# Altium footprint library MasterLib.PcbLib: 54 footprints (part 4 of 4)
Each footprint in its own frame and in the unit in brackets; x right, y up, seen from the top. Pads: shape width x height; smd on the part's side, far side on the other; paste and mask are expansions set on the pad; w line width, h text height; cw(c..) or ccw(c..) is an arc to the next point about the centre after c.
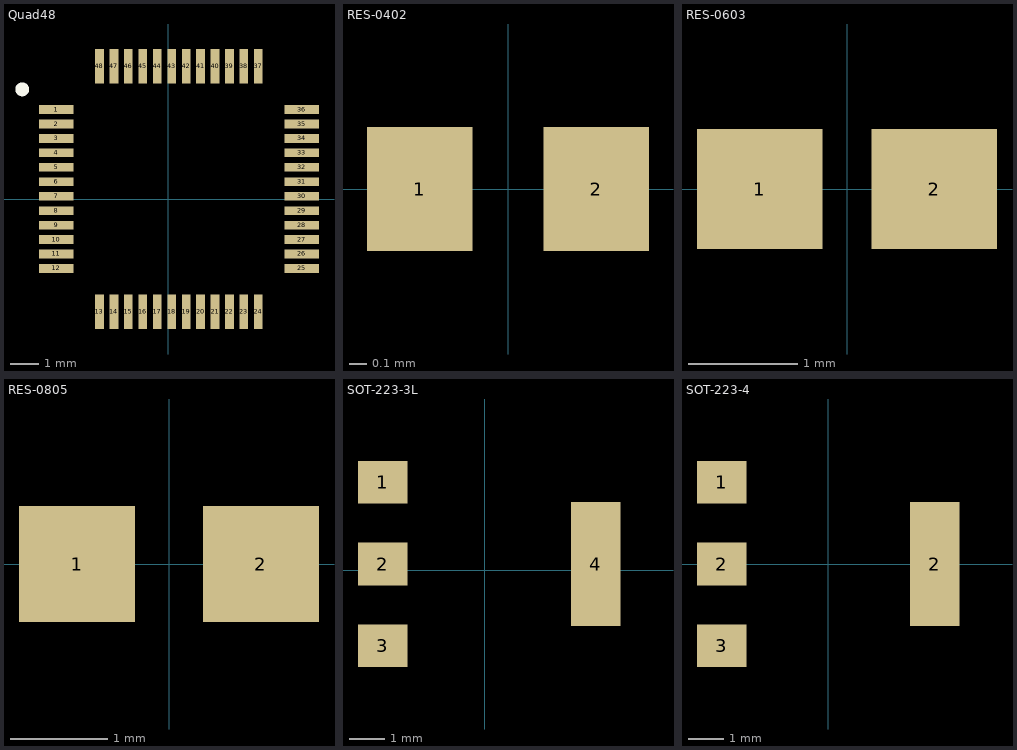
[diagram p3: the footprints below, top view; thin cyan lines are the x and y axes]

## Quad48 [mm]
pads (48):
  rect 1.2x0.3 smd: 1(-3.875,3.1) 2(-3.875,2.6) 3(-3.875,2.1) 4(-3.875,1.6) 5(-3.875,1.1) 6(-3.875,0.6) 7(-3.875,0.1) 8(-3.875,-0.4) 9(-3.875,-0.9) 10(-3.875,-1.4) 11(-3.875,-1.9) 12(-3.875,-2.4) 25(4.625,-2.4) 26(4.625,-1.9) 27(4.625,-1.4) 28(4.625,-0.9) 29(4.625,-0.4) 30(4.625,0.1) 31(4.625,0.6) 32(4.625,1.1) 33(4.625,1.6) 34(4.625,2.1) 35(4.625,2.6) 36(4.625,3.1)
  rect 0.3x1.2 smd: 13(-2.375,-3.9) 14(-1.875,-3.9) 15(-1.375,-3.9) 16(-0.875,-3.9) 17(-0.375,-3.9) 18(0.125,-3.9) 19(0.625,-3.9) 20(1.125,-3.9) 21(1.625,-3.9) 22(2.125,-3.9) 23(2.625,-3.9) 24(3.125,-3.9) 37(3.125,4.6) 38(2.625,4.6) 39(2.125,4.6) 40(1.625,4.6) 41(1.125,4.6) 42(0.625,4.6) 43(0.125,4.6) 44(-0.375,4.6) 45(-0.875,4.6) 46(-1.375,4.6) 47(-1.875,4.6) 48(-2.375,4.6)
Top Overlay:
  lines w0.254: -4.963,3.73 cw(c-5.05,3.8) -4.95,3.75
3D body "LQFP48-7x7mm.step": height 1.6, standoff 0, extent -4.122,-4.147 4.872,4.847

## RES-0402 [mm]
pads (2):
  rect 0.6x0.7 smd: 1(-0.5,0) 2(0.5,0)
3D body "1879131-6.stp": height 0.3, standoff 0, extent -0.5,-0.25 0.5,0.25

## RES-0603 [mm]
pads (2):
  rect 1.15x1.1 smd: 1(-0.8,0) 2(0.8,0)
3D body "2176051-4.STEP": height 0.43, standoff -0.03, extent -0.8,-0.4 0.8,0.4

## RES-0805 [mm]
pads (2):
  rect 1.2x1.2 smd: 1(-0.95,0) 2(0.95,0)
3D body "RC0805N_PAN.step": height 0.71, standoff 0, extent -1,-0.6 1,0.6

## SOT-223-3L [mm]
pads (4):
  rect 1.4x1.2 smd mask+0.07: 1(-2.875,2.475) 2(-2.875,0.175) 3(-2.875,-2.125)
  rect 1.4x3.5 smd: 4(3.125,0.175)
3D body "DCY0004A.stp": height 1.68, standoff 0, extent -3.375,-3.075 3.625,3.425

## SOT-223-4 [mm]
pads (4):
  rect 1.4x1.2 smd mask+0.07: 1(-3,2.3) 2(-3,0) 3(-3,-2.3)
  rect 1.4x3.5 smd: 2(3,0)
3D body "DCY0004A.stp": height 1.68, standoff 0, extent -3.5,-3.25 3.5,3.25